# Altium footprint library KM_ALTIUM.PcbLib: 265 footprints (part 6 of 17)
Each footprint in its own frame and in the unit in brackets; x right, y up, seen from the top. Pads: shape width x height; smd on the part's side, far side on the other; paste and mask are expansions set on the pad; w line width, h text height; cw(c..) or ccw(c..) is an arc to the next point about the centre after c.
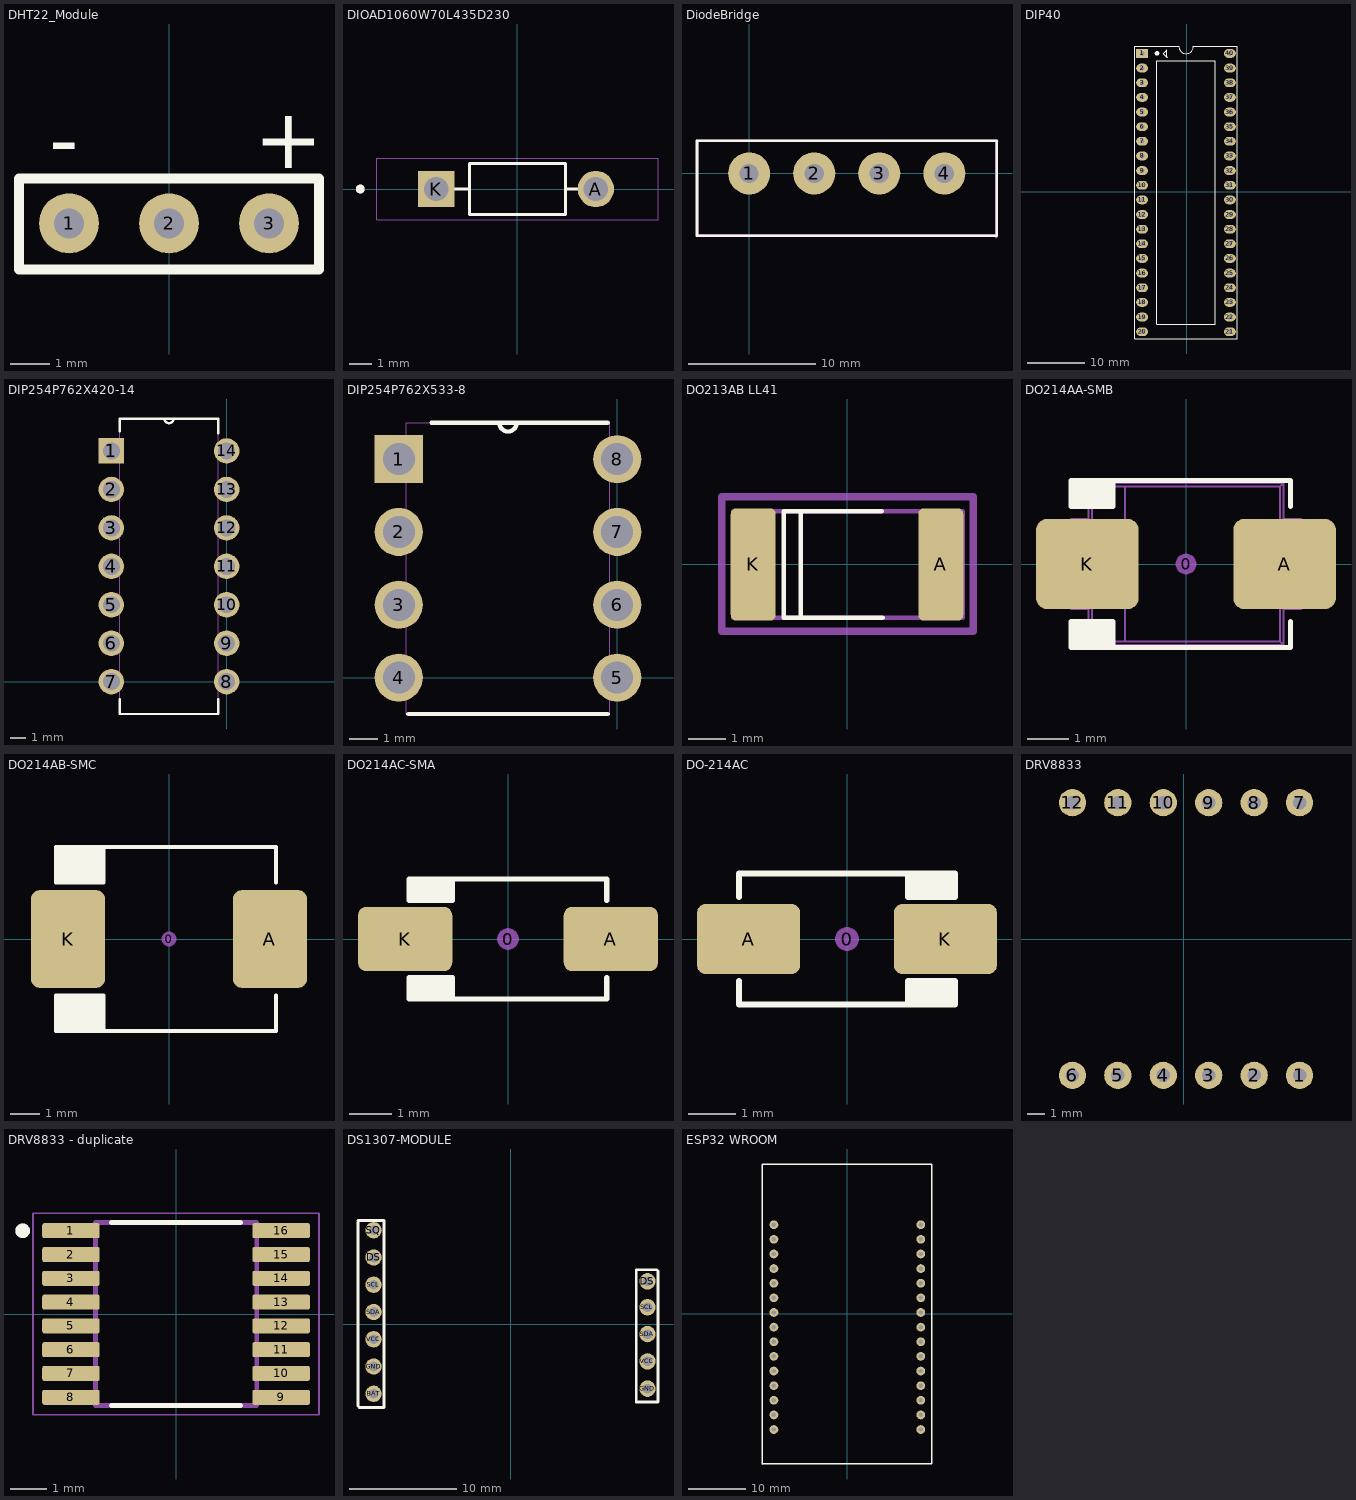
[diagram p5: the footprints below, top view; thin cyan lines are the x and y axes]

## DHT22_Module [mil]
pads (3):
  round 60 hole 30: 1(-100,205) 2(0,205) 3(100,205)
Top Overlay:
  lines w10: -150,158.54 150,158.54 150,250 140,250 0,250 -150,250 -150,158.54
  text "+" at 85,260 h60
  text "-" at -120,260.01 h60
3D body "DHT22.STEP": height 1381.77, standoff -218.5, extent -295.27,-59.05 295.28,366.14

## DIOAD1060W70L435D230 [mm]
pads (2):
  round 1.65 hole 1.1: A(3.556,0)
  rect 1.65x1.65 hole 1.1: K(-3.683,0)
Top Overlay:
  circle w0.2: c-7.125,0 r0.1
  lines w0.127: -4.155,0 -2.175,0 ; 4.155,0 2.175,0 ; -2.175,0 -2.175,-1.15 2.175,-1.15 2.175,0 ; -2.175,0 -2.175,1.15 2.175,1.15 2.175,0
Mechanical 13:
  circle w0.2: c-7.125,0 r0.1
  lines w0.127: -2.175,-1.15 2.175,-1.15 2.175,0 2.175,1.15 -2.175,1.15 -2.175,0 -2.175,-1.15
Mechanical 15:
  lines w0.05: -6.375,-1.4 -6.375,1.4 6.375,1.4 6.375,-1.4 -6.375,-1.4
3D body "DO-35.step": height 1, standoff -4, extent -4.058,-1.004 4.058,1.004

## DiodeBridge [mm]
pads (4):
  round 3.3 hole 1.5: 1(0,0) 2(5.1,0) 3(10.2,0) 4(15.3,0)
Top Overlay:
  lines w0.203: -4.089,-4.877 -4.089,2.565 19.406,2.565 19.406,-4.877 -4.089,-4.877
Mechanical 3:
  lines w0.203: 19.406,2.515 19.431,2.54 ; -4.064,-4.851 19.228,-4.851 19.38,-5.004 19.38,2.54 19.406,2.565 -4.064,2.565 -4.064,-4.851
3D body "User Library-Silicon Bridge Rectifiers KBU1010.STEP": height 17.31, standoff -24.99, extent -3.929,-4.547 19.271,2.403

## DIP40 [mil]
pads (40):
  rect 80x60 hole 31.5: 1(-306,944)
  oval 80x60 hole 31.5: 2(-306,844) 3(-306,744) 4(-306,644) 5(-306,544) 6(-306,444) 7(-306,344) 8(-306,244) 9(-306,144) 10(-306,44) 11(-306,-56) 12(-306,-156) 13(-306,-256) 14(-306,-356) 15(-306,-456) 16(-306,-556) 17(-306,-656) 18(-306,-756) 19(-306,-856) 20(-306,-956) 21(294,-956) 22(294,-856) 23(294,-756) 24(294,-656) 25(294,-556) 26(294,-456) 27(294,-356) 28(294,-256) 29(294,-156) 30(294,-56) 31(294,44) 32(294,144) 33(294,244) 34(294,344) 35(294,444) 36(294,544) 37(294,644) 38(294,744) 39(294,844) 40(294,944)
Top Overlay:
  circle w15: c-204,945 r8
  lines w7: -55,994 -356,994 -356,-1006 344,-1006 344,994 46,994 ; -54.95,994.38 ccw(c-4.98,992.68) 45,994 ; -206,-906 194,-906 194,894 -206,894 -206,-906 ; -161,943 -137,919 -135,919 -136,920 -136,968 -136,967 -160,943 -161,943
3D body "SW3dPS-DIP40-600.STEP": height 224.41, standoff -101.57, extent -316,-1038.48 293.84,1026.48

## DIP254P762X420-14 [mil]
pads (14):
  rect 66x66 / inner round 66 / far side rect 66x66 hole 44: 1(-300,600)
  round 66 hole 44: 2(-300,500) 3(-300,400) 4(-300,300) 5(-300,200) 6(-300,100) 7(-300,0) 8(0,0) 9(0,100) 10(0,200) 11(0,300) 12(0,400) 13(0,500) 14(0,600)
Top Overlay:
  lines w6: -278,-46 -278,-84 -22,-84 -22,-46 ; -278,651 -278,684 -162,684 ; -22,646 -22,684 -138,684 ; -162,684 ccw(c-150,684) -138,684 ; -162,684 -138,684
Mechanical 13:
  lines w0: -162,684 ccw(c-150,684) -138,684 ; -162,684 -278,684 -278,-84 -22,-84 -22,684 -138,684 ; -162,684 -138,684 ; -322,-22 -278,-22 -278,22 -322,22 -322,-22 ; -322,78 -278,78 -278,122 -322,122 -322,78 ; -322,178 -278,178 -278,222 -322,222 -322,178 ; -322,278 -278,278 -278,322 -322,322 -322,278 ; -322,378 -278,378 -278,422 -322,422 -322,378 ; -322,478 -278,478 -278,522 -322,522 -322,478 ; -322,578 -278,578 -278,622 -322,622 -322,578 ; -22,-22 22,-22 22,22 -22,22 -22,-22 ; -22,78 22,78 22,122 -22,122 -22,78 ; -22,178 22,178 22,222 -22,222 -22,178 ; -22,278 22,278 22,322 -22,322 -22,278 ; -22,378 22,378 22,422 -22,422 -22,378 ; -22,478 22,478 22,522 -22,522 -22,478 ; -22,578 22,578 22,622 -22,622 -22,578
3D body "step_temp.STEP": height 90, standoff -235, extent -370,-80 60,680

## DIP254P762X533-8 [mil]
pads (8):
  rect 66x66 / inner round 66 / far side rect 66x66 hole 44: 1(-300,300)
  round 66 hole 44: 2(-300,200) 3(-300,100) 4(-300,0) 5(0,0) 6(0,100) 7(0,200) 8(0,300)
Top Overlay:
  lines w6: -287,-50 -13,-50 ; -255,350 -162,350 ; -13,350 -138,350 ; -162,350 ccw(c-150,350) -138,350 ; -162,350 -138,350
Mechanical 13:
  lines w0: -162,350 ccw(c-150,350) -138,350 ; -162,350 -290,350 -290,-50 -10,-50 -10,350 -138,350 ; -162,350 -138,350 ; -322,-22 -290,-22 -290,22 -322,22 -322,-22 ; -322,78 -290,78 -290,122 -322,122 -322,78 ; -322,178 -290,178 -290,222 -322,222 -322,178 ; -322,278 -290,278 -290,322 -322,322 -322,278 ; -10,-22 22,-22 22,22 -10,22 -10,-22 ; -10,78 22,78 22,122 -10,122 -10,78 ; -10,178 22,178 22,222 -10,222 -10,178 ; -10,278 22,278 22,322 -10,322 -10,278
3D body "step_temp.STEP": height 200, standoff -129.92, extent -304.92,-26.1 4.93,336.11

## DO213AB LL41 [mm]
pads (2):
  rrect25% 1.2x3 smd: A(2.489,0) K(-2.515,0)
Top Overlay:
  lines w0.127: -1.245,-1.422 -1.245,1.422 ; 0.914,1.422 -1.702,1.422 -1.702,-1.422 0.94,-1.422
Mechanical 13:
  lines w0.127: -3.048,-1.422 3.073,-1.422 3.073,1.422 -3.048,1.422 -3.048,-1.422
Mechanical 15:
  lines w0.203: -3.353,-1.778 3.353,-1.778 3.353,1.803 -3.353,1.803 -3.353,-1.778
3D body "User Library-Vishay - MELF DO-213AB.step": height 2.67, standoff 0, extent -2.651,-1.335 2.549,1.335

## DO214AA-SMB [mm]
pads (3):
  round 0.508 on Mech15: 0(0,0)
  rrect25% 2.5x2.2 smd: A(2.4,0) K(-2.4,0)
Top Overlay:
  region: -1.778,1.397 -1.778,2.032 -2.794,2.032 -2.794,1.397
  region: -1.778,-1.397 -1.778,-2.032 -2.794,-2.032 -2.794,-1.397
  lines w0.127: 2.54,-1.397 2.54,-2.032 -1.778,-2.032 ; 2.54,1.397 2.54,2.032 -1.778,2.032 ; -1.778,-2.032 -1.778,-1.397 -2.794,-1.397 -2.794,-2.032 -1.778,-2.032 ; -1.778,2.032 -2.794,2.032 -2.794,1.397 -1.778,1.397 -1.778,2.032
Mechanical 13:
  lines w0.05: -2.375,-1.1 -2.375,-1.973 ; -2.375,1.1 -2.375,1.973 ; 2.375,-1.1 2.375,-1.973 ; 2.375,1.1 2.375,1.973 ; -2.375,-1.973 -2.373,-1.975 2.373,-1.975 2.375,-1.973 ; -2.375,-1.973 -2.285,-1.884 ; -2.375,1.973 -2.285,1.884 ; -2.375,1.973 -2.373,1.975 2.373,1.975 2.375,1.973 ; -2.285,-1.884 -1.485,-1.884 ; -2.285,-1.884 -2.285,1.884 ; -2.285,1.884 -1.485,1.884 ; -1.485,-1.884 2.285,-1.883 ; -1.485,-1.884 -1.485,1.884 ; -1.485,1.884 2.285,1.883 ; 2.285,-1.883 2.375,-1.973 ; 2.285,-1.883 2.285,1.883 ; 2.285,1.883 2.375,1.973 ; -2.8,-1.1 -2.356,-1.1 -2.356,1.1 -2.8,1.1 -2.8,-1.1 ; 2.356,-1.1 2.356,1.1 2.8,1.1 2.8,-1.1 2.356,-1.1
3D body "User Library-DIOM5539X24.step": height 2.26, standoff -0.16, extent -2.75,-1.95 2.75,1.95

## DO214AB-SMC [mm]
pads (3):
  round 0.508 on Mech15: 0(0,0)
  rrect25% 2.5x3.3 smd: A(3.4,0) K(-3.4,0)
Top Overlay:
  region: -2.2,-1.9 -3.8,-1.9 -3.8,-3.1 -2.2,-3.1
  region: -2.2,3.1 -3.8,3.1 -3.8,1.9 -2.2,1.9
  lines w0.127: -2.2,-3.1 -2.2,-1.9 -3.8,-1.9 -3.8,-3.1 3.6,-3.1 3.6,-1.9 ; -2.2,3.1 -2.2,1.9 -3.8,1.9 -3.8,3.1 3.6,3.1 3.6,1.9
3D body "User Library-DIOM8261X24.STEP": height 2.26, standoff -0.1, extent -4.116,-3.05 4.014,3.05

## DO214AC-SMA [mm]
pads (3):
  round 0.508 on Mech15: 0(0,0)
  rrect25% 2.2x1.5 smd: A(2.4,0) K(-2.4,0)
Top Overlay:
  region: -1.3,-0.9 -2.3,-0.9 -2.3,-1.4 -1.3,-1.4
  region: -1.3,1.4 -2.3,1.4 -2.3,0.9 -1.3,0.9
  lines w0.127: -1.3,-1.4 -1.3,-0.911 ; -1.3,-0.9 -2.3,-0.9 -2.3,-1.4 2.3,-1.4 2.3,-0.9 ; -1.3,1.4 -1.3,0.9 -2.3,0.9 -2.3,1.4 2.3,1.4 2.3,0.9
3D body "User Library-DO-214AC.STEP": height 2.6, standoff 0.03, extent -2.75,-1.425 2.75,1.375

## DO-214AC [mm]
pads (3):
  round 0.508 on Mech15: 0(0,0)
  rrect25% 2.2x1.5 smd: A(-2.1,0) K(2.1,0)
Top Overlay:
  rectangle: 1.3,-1.4 2.3,-0.9
  rectangle: 1.3,0.9 2.3,1.4
  lines w0.127: -2.3,-0.9 -2.3,-1.4 2.3,-1.4 2.3,-0.9 1.3,-0.9 1.3,-1.4 ; -2.3,0.9 -2.3,1.4 2.3,1.4 2.3,0.9 1.3,0.9 ; 1.3,0.911 1.3,1.4
3D body "SW3dPS-DO-214AC SMA.STEP": height 2.42, standoff 0.02, extent -2.6,-1.3 2.6,1.3

## DRV8833 [mil] "Module"
pads (12):
  round 60 hole 30: 1(254.92,-299.22) 2(154.92,-299.22) 3(54.92,-299.22) 4(-45.08,-299.22) 5(-145.08,-299.22) 6(-245.08,-299.22) 7(254.92,301.18) 8(154.92,301.18) 9(54.92,301.18) 10(-45.08,301.18) 11(-145.08,301.18) 12(-245.08,301.18)
3D body "Female_Header_1x6_P2.54_H8.5_straight.step": height 334.65, standoff -118.11, extent -295,-345 305,-246.57
3D body "Female_Header_1x6_P2.54_H8.5_straight.step": height 334.65, standoff -118.11, extent -295,255 305,353.43
3D body "HBridgeDRV8833.step": height 531.5, standoff 98.43, extent -312.99,-362.2 312.99,362.2

## DRV8833 - duplicate [mm] "SMD, TSSOP16"
pads (16):
  rrect25% 1.57x0.41 smd: 1(-2.87,2.275) 2(-2.87,1.625) 3(-2.87,0.975) 4(-2.87,0.325) 5(-2.87,-0.325) 6(-2.87,-0.975) 7(-2.87,-1.625) 8(-2.87,-2.275) 9(2.87,-2.275) 10(2.87,-1.625) 11(2.87,-0.975) 12(2.87,-0.325) 13(2.87,0.325) 14(2.87,0.975) 15(2.87,1.625) 16(2.87,2.275)
Top Overlay:
  circle w0.2: c-4.19,2.275 r0.1
  lines w0.127: -1.765,-2.5 1.765,-2.5 ; -1.765,2.5 1.765,2.5
Mechanical 13:
  circle w0.2: c-4.19,2.275 r0.1
  lines w0.127: -2.2,-2.5 -2.2,2.5 2.2,2.5 2.2,-2.5 -2.2,-2.5
Mechanical 15:
  lines w0.05: -3.905,-2.75 -3.905,2.75 3.905,2.75 3.905,-2.75 -3.905,-2.75
3D body "DRV8833PW.STEP": height 1.2, standoff 0, extent -3.2,-2.5 3.2,2.5

## DS1307-MODULE [mil]
pads (12):
  round 60 hole 35.43 mask+5.91: BAT(-502.86,-255.17) DS(-502.86,244.83) DS(501.46,157.2) GND(-502.86,-155.17) GND(501.46,-236.22) SCL(-502.86,144.83) SCL(501.46,62.2) SDA(-502.86,44.83) SDA(501.46,-36.22) SQ(-502.86,344.83) VCC(-502.86,-55.17) VCC(501.46,-136.22)
Top Overlay:
  lines w10: -560,375 -560,-300 -555,-305 -465,-305 -465,380 -560,380 ; 460,-285 540,-285 540,195 535,200 460,200 460,-285
3D body "HW-111_RTCmodule_DS1307.STEP": height 220.47, standoff -181.1, extent -541.34,-600.39 541.34,521.65

## ELQ3H7 [mm]

## ESP32 WROOM [mil]
pads (30):
  round 60 hole 30: 3V3(-501.97,610.24) D2(-501.97,310.24) D4(-501.97,210.24) D5(-501.97,-89.76) D12(501.97,310.24) D13(501.97,410.24) D14(501.97,210.24) D15(-501.97,410.24) D16(-501.97,110.24) D17(-501.97,10.24) D18(-501.97,-189.76) D19(-501.97,-289.76) D21(-501.97,-389.76) D22(-501.97,-689.76) D23(-501.97,-789.76) D25(501.97,-89.76) D26(501.97,10.24) D27(501.97,110.24) D32(501.97,-289.76) D33(501.97,-189.76) D34(501.97,-489.76) D35(501.97,-389.76) EN(501.97,-789.76) GND(-501.97,510.24) GND(501.97,510.24) RX0(-501.97,-489.76) TX0(-501.97,-589.76) VIN(501.97,610.24) VN(501.97,-589.76) VP(501.97,-689.76)
Top Overlay:
  lines w10: -580,-1025.16 -579.84,-1025 575,-1025 575,1025 -580,1025 -580,-1020 -580,-1025.16
3D body "Female_Header_1x15_P2.54_H8.5_straight.step": height 334.65, standoff -118.11, extent 452.76,-839.76 551.18,660.24
3D body "Female_Header_1x15_P2.54_H8.5_straight.step": height 334.65, standoff -118.11, extent -551.18,-839.76 -452.75,660.24
3D body "ESP-WROOM32.STEP": height 598.57, standoff 110.38, extent -561.02,-1002.56 561.02,1002.56